# Altium schematic symbol library RC0603JR-070RL.SchLib: 1 symbol
Pins are listed as number, name and electrical type; pins without a type are passive.

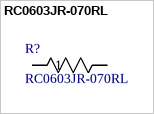
[diagram p0: symbol RC0603JR-070RL]

## RC0603JR-070RL
designator R?
RES SMD 0 OHM 1% JUMPER 1/10W 0603; Manufacturer_Name: Yageo; Copyright: Copyright (C) 2025 Ultra Librarian. All rights reserved.; Manufacturer_Part_Number: RC0603JR-070RL
footprint RC0603N_YAG
pins: 1, 2